# Altium schematic symbol library GRM31CR71E106KA12L.SchLib: 1 symbol
Pins are listed as number, name and electrical type; pins without a type are passive.

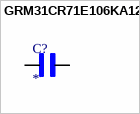
[diagram p0: symbol GRM31CR71E106KA12L]

## GRM31CR71E106KA12L
designator C?
SMD capacitor X7R(EIA) with capacitance 10uF Tol.10%. Rated voltage 25Vdc 125C; MF: Murata Electronics; MP: GRM31CR71E106KA12L; SnapEDA_Link: https://www.snapeda.com/parts/GRM31CR71E106KA12L/Murata+Electronics+North+America/view-part/?ref=snap; Package: 1206 Murata; Value: *; Check_prices: https://www.snapeda.com/parts/GRM31CR71E106KA12L/Murata+Electronics+North+America/view-part/?ref=eda
footprint CAPC3216X180N
pins: 1, 2